# Altium footprint library WR-PHD_Pin Header_2.00mm.PcbLib: 63 footprints (part 3 of 4)
Each footprint in its own frame and in the unit in brackets; x right, y up, seen from the top. Pads: shape width x height; smd on the part's side, far side on the other; paste and mask are expansions set on the pad; w line width, h text height; cw(c..) or ccw(c..) is an arc to the next point about the centre after c.
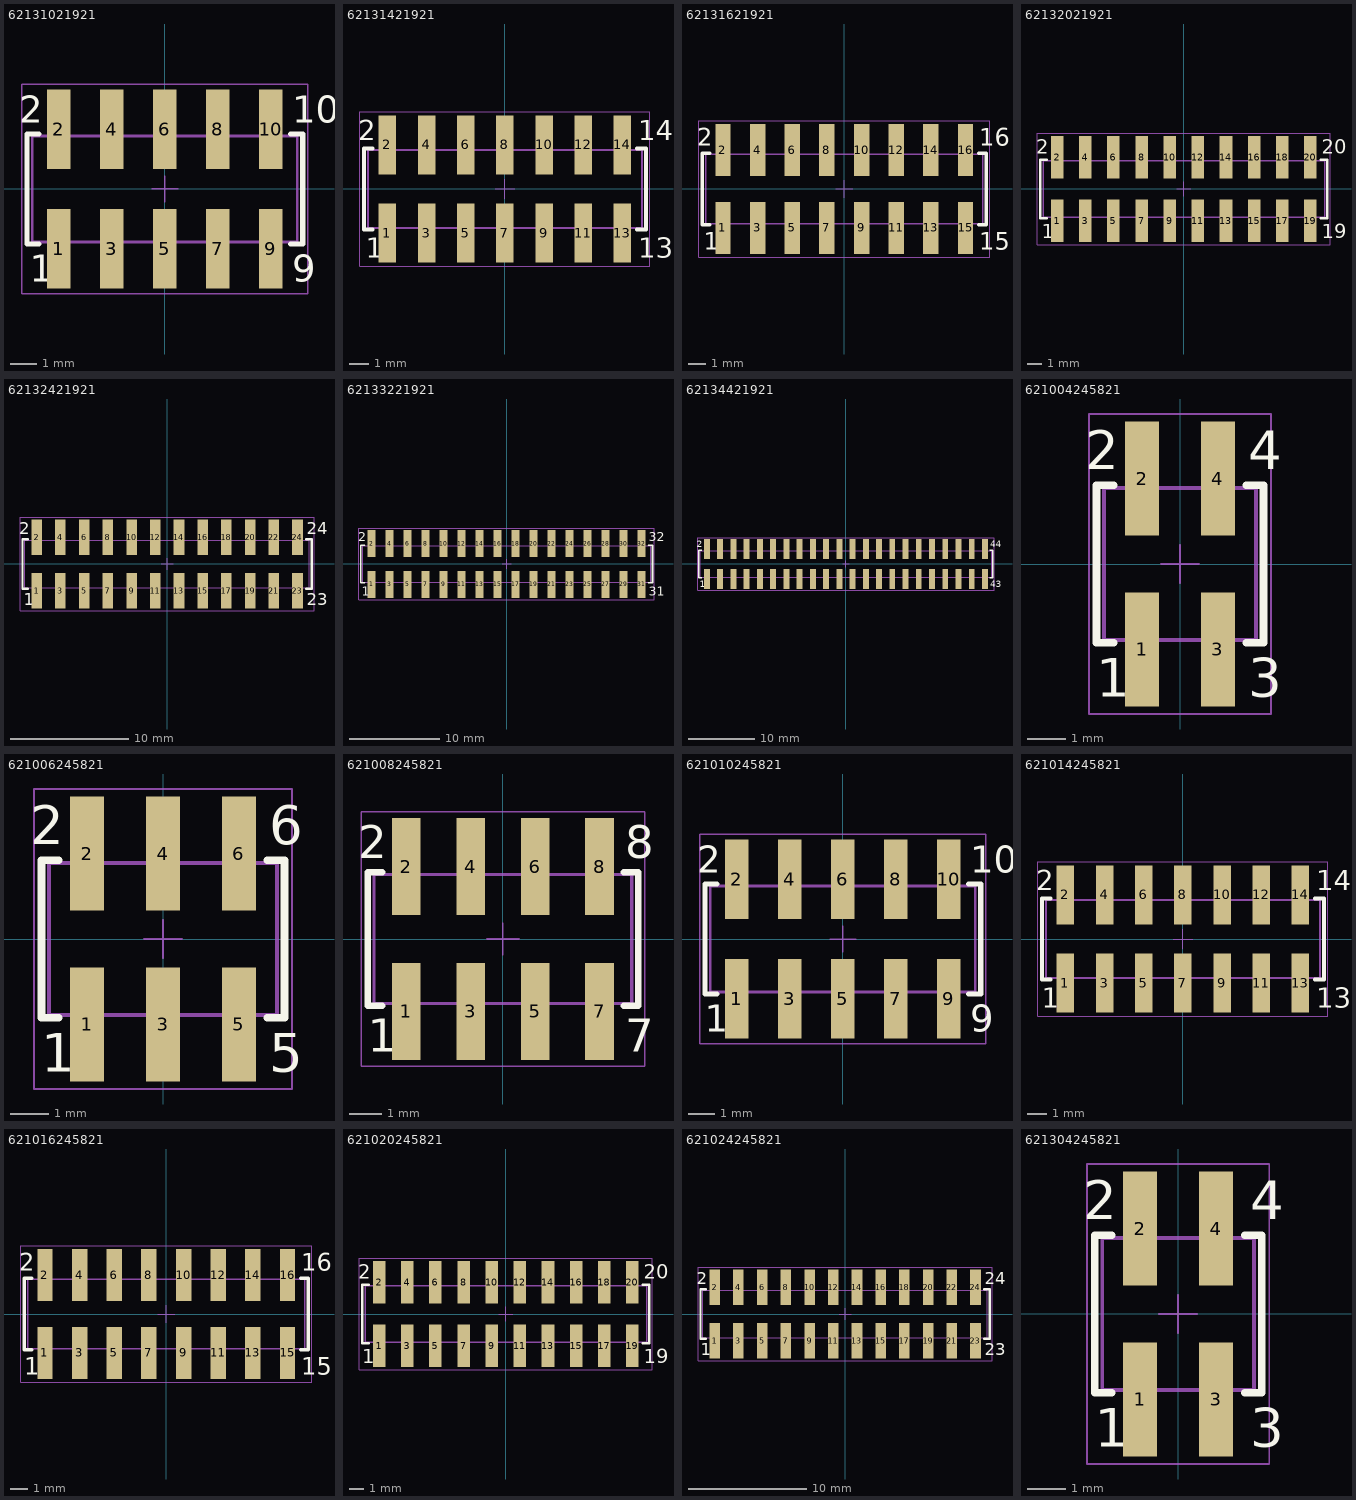
[diagram p2: the footprints below, top view; thin cyan lines are the x and y axes]

## 62131021921 [mm] "Pin Header, pitch 2.00 mm, SMD, Vertical, dual row, 10p"
height 6.8
pads (10):
  rect 0.89x3 smd: 1(-4,-2.25) 2(-4,2.25) 3(-2,-2.25) 4(-2,2.25) 5(0,-2.25) 6(0,2.25) 7(2,-2.25) 8(2,2.25) 9(4,-2.25) 10(4,2.25)
Top Overlay:
  lines w0.2: -4.75,-2.075 -5.2,-2.075 -5.2,2.075 -4.75,2.075 ; 4.75,-2.075 5.2,-2.075 5.2,2.075 4.75,2.075
  text "9" at 4.8,-3.5 h1.02
  text "10" at 4.8,2.5 h1.02
  text "1" at -5.1,-3.5 h1.02
  text "2" at -5.5,2.5 h1.02
Mechanical 13:
  lines w0.1: -4.25,-2 -4.25,-3.1 -3.75,-3.1 -3.75,-2 ; -4.25,2 -4.25,3.1 -3.75,3.1 -3.75,2 ; -2.25,-2 -2.25,-3.1 -1.75,-3.1 -1.75,-2 ; -2.25,2 -2.25,3.1 -1.75,3.1 -1.75,2 ; -0.25,-2 -0.25,-3.1 0.25,-3.1 0.25,-2 ; -0.25,2 -0.25,3.1 0.25,3.1 0.25,2 ; 1.75,-2 1.75,-3.1 2.25,-3.1 2.25,-2 ; 1.75,2 1.75,3.1 2.25,3.1 2.25,2 ; 3.75,-2 3.75,-3.1 4.25,-3.1 4.25,-2 ; 3.75,2 3.75,3.1 4.25,3.1 4.25,2 ; -5,-2 -5,2 5,2 5,-2 -5,-2
Mechanical 15:
  lines w0.05: -0.5,0 0.5,0 ; 0,-0.5 0,0.5 ; -5.4,-3.95 -5.4,3.95 5.4,3.95 5.4,-3.95 -5.4,-3.95
3D body "62131021921.stp": height 6.7, standoff 0, extent -5,-3.1 5,3.1

## 62131421921 [mm] "Pin Header, pitch 2.00 mm, SMD, Vertical, dual row, 14p"
height 6.8
pads (14):
  rect 0.89x3 smd: 1(-6,-2.25) 2(-6,2.25) 3(-4,-2.25) 4(-4,2.25) 5(-2,-2.25) 6(-2,2.25) 7(0,-2.25) 8(0,2.25) 9(2,-2.25) 10(2,2.25) 11(4,-2.25) 12(4,2.25) 13(6,-2.25) 14(6,2.25)
Top Overlay:
  lines w0.2: -6.75,-2.075 -7.2,-2.075 -7.2,2.075 -6.75,2.075 ; 6.75,-2.075 7.2,-2.075 7.2,2.075 6.75,2.075
  text "13" at 6.8,-3.5 h1.02
  text "14" at 6.8,2.5 h1.02
  text "2" at -7.5,2.5 h1.02
  text "1" at -7.1,-3.5 h1.02
Mechanical 13:
  lines w0.1: -6.25,-2 -6.25,-3.1 -5.75,-3.1 -5.75,-2 ; -6.25,2 -6.25,3.1 -5.75,3.1 -5.75,2 ; -4.25,-2 -4.25,-3.1 -3.75,-3.1 -3.75,-2 ; -4.25,2 -4.25,3.1 -3.75,3.1 -3.75,2 ; -2.25,-2 -2.25,-3.1 -1.75,-3.1 -1.75,-2 ; -2.25,2 -2.25,3.1 -1.75,3.1 -1.75,2 ; -0.25,-2 -0.25,-3.1 0.25,-3.1 0.25,-2 ; -0.25,2 -0.25,3.1 0.25,3.1 0.25,2 ; 1.75,-2 1.75,-3.1 2.25,-3.1 2.25,-2 ; 1.75,2 1.75,3.1 2.25,3.1 2.25,2 ; 3.75,-2 3.75,-3.1 4.25,-3.1 4.25,-2 ; 3.75,2 3.75,3.1 4.25,3.1 4.25,2 ; 5.75,-2 5.75,-3.1 6.25,-3.1 6.25,-2 ; 5.75,2 5.75,3.1 6.25,3.1 6.25,2 ; -7,-2 7,-2 7,2 -7,2 -7,-2
Mechanical 15:
  lines w0.05: -0.5,0 0.5,0 ; 0,-0.5 0,0.5 ; -7.4,-3.95 7.4,-3.95 7.4,3.95 -7.4,3.95 -7.4,-3.95
3D body "62131421921.stp": height 6.7, standoff 0, extent -7,-3.1 7,3.1

## 62131621921 [mm] "Pin Header, pitch 2.00 mm, SMD, Vertical, dual row, 16p"
height 6.8
pads (16):
  rect 0.89x3 smd: 1(-7,-2.25) 2(-7,2.25) 3(-5,-2.25) 4(-5,2.25) 5(-3,-2.25) 6(-3,2.25) 7(-1,-2.25) 8(-1,2.25) 9(1,-2.25) 10(1,2.25) 11(3,-2.25) 12(3,2.25) 13(5,-2.25) 14(5,2.25) 15(7,-2.25) 16(7,2.25)
Top Overlay:
  lines w0.2: -7.75,-2.075 -8.2,-2.075 -8.2,2.075 -7.75,2.075 ; 7.75,-2.075 8.2,-2.075 8.2,2.075 7.75,2.075
  text "15" at 7.8,-3.5 h1.02
  text "16" at 7.8,2.5 h1.02
  text "1" at -8.1,-3.5 h1.02
  text "2" at -8.5,2.5 h1.02
Mechanical 13:
  lines w0.1: -7.25,-2 -7.25,-3.1 -6.75,-3.1 -6.75,-2 ; -7.25,2 -7.25,3.1 -6.75,3.1 -6.75,2 ; -5.25,-2 -5.25,-3.1 -4.75,-3.1 -4.75,-2 ; -5.25,2 -5.25,3.1 -4.75,3.1 -4.75,2 ; -3.25,-2 -3.25,-3.1 -2.75,-3.1 -2.75,-2 ; -3.25,2 -3.25,3.1 -2.75,3.1 -2.75,2 ; -1.25,-2 -1.25,-3.1 -0.75,-3.1 -0.75,-2 ; -1.25,2 -1.25,3.1 -0.75,3.1 -0.75,2 ; 0.75,-2 0.75,-3.1 1.25,-3.1 1.25,-2 ; 0.75,2 0.75,3.1 1.25,3.1 1.25,2 ; 2.75,-2 2.75,-3.1 3.25,-3.1 3.25,-2 ; 2.75,2 2.75,3.1 3.25,3.1 3.25,2 ; 4.75,-2 4.75,-3.1 5.25,-3.1 5.25,-2 ; 4.75,2 4.75,3.1 5.25,3.1 5.25,2 ; 6.75,-2 6.75,-3.1 7.25,-3.1 7.25,-2 ; 6.75,2 6.75,3.1 7.25,3.1 7.25,2 ; -8,-2 -8,2 8,2 8,-2 -8,-2
Mechanical 15:
  lines w0.05: -0.5,0 0.5,0 ; 0,-0.5 0,0.5 ; -8.4,-3.95 -8.4,3.95 8.4,3.95 8.4,-3.95 -8.4,-3.95
3D body "62131621921.stp": height 6.7, standoff 0, extent -8,-3.1 8,3.1

## 62132021921 [mm] "Pin Header, pitch 2.00 mm, SMD, Vertical, dual row, 20p"
height 6.8
pads (20):
  rect 0.89x3 smd: 1(-9,-2.25) 2(-9,2.25) 3(-7,-2.25) 4(-7,2.25) 5(-5,-2.25) 6(-5,2.25) 7(-3,-2.25) 8(-3,2.25) 9(-1,-2.25) 10(-1,2.25) 11(1,-2.25) 12(1,2.25) 13(3,-2.25) 14(3,2.25) 15(5,-2.25) 16(5,2.25) 17(7,-2.25) 18(7,2.25) 19(9,-2.25) 20(9,2.25)
Top Overlay:
  lines w0.2: -9.75,-2.075 -10.2,-2.075 -10.2,2.075 -9.75,2.075 ; 9.75,-2.075 10.2,-2.075 10.2,2.075 9.75,2.075
  text "19" at 9.8,-3.5 h1.02
  text "20" at 9.8,2.5 h1.02
  text "2" at -10.5,2.5 h1.02
  text "1" at -10.1,-3.5 h1.02
Mechanical 13:
  lines w0.1: -9.25,-2 -9.25,-3.1 -8.75,-3.1 -8.75,-2 ; -9.25,2 -9.25,3.1 -8.75,3.1 -8.75,2 ; -7.25,-2 -7.25,-3.1 -6.75,-3.1 -6.75,-2 ; -7.25,2 -7.25,3.1 -6.75,3.1 -6.75,2 ; -5.25,-2 -5.25,-3.1 -4.75,-3.1 -4.75,-2 ; -5.25,2 -5.25,3.1 -4.75,3.1 -4.75,2 ; -3.25,-2 -3.25,-3.1 -2.75,-3.1 -2.75,-2 ; -3.25,2 -3.25,3.1 -2.75,3.1 -2.75,2 ; -1.25,-2 -1.25,-3.1 -0.75,-3.1 -0.75,-2 ; -1.25,2 -1.25,3.1 -0.75,3.1 -0.75,2 ; 0.75,-2 0.75,-3.1 1.25,-3.1 1.25,-2 ; 0.75,2 0.75,3.1 1.25,3.1 1.25,2 ; 2.75,-2 2.75,-3.1 3.25,-3.1 3.25,-2 ; 2.75,2 2.75,3.1 3.25,3.1 3.25,2 ; 4.75,-2 4.75,-3.1 5.25,-3.1 5.25,-2 ; 4.75,2 4.75,3.1 5.25,3.1 5.25,2 ; 6.75,-2 6.75,-3.1 7.25,-3.1 7.25,-2 ; 6.75,2 6.75,3.1 7.25,3.1 7.25,2 ; 8.75,-2 8.75,-3.1 9.25,-3.1 9.25,-2 ; 8.75,2 8.75,3.1 9.25,3.1 9.25,2 ; -10,-2 10,-2 10,2 -10,2 -10,-2
Mechanical 15:
  lines w0.05: -0.5,0 0.5,0 ; 0,-0.5 0,0.5 ; -10.4,-3.95 10.4,-3.95 10.4,3.95 -10.4,3.95 -10.4,-3.95
3D body "62132021921.stp": height 6.7, standoff 0, extent -10,-3.1 10,3.1

## 62132421921 [mm] "Pin Header, pitch 2.00 mm, SMD, Vertical, dual row, 24p"
height 6.8
pads (24):
  rect 0.89x3 smd: 1(-11,-2.25) 2(-11,2.25) 3(-9,-2.25) 4(-9,2.25) 5(-7,-2.25) 6(-7,2.25) 7(-5,-2.25) 8(-5,2.25) 9(-3,-2.25) 10(-3,2.25) 11(-1,-2.25) 12(-1,2.25) 13(1,-2.25) 14(1,2.25) 15(3,-2.25) 16(3,2.25) 17(5,-2.25) 18(5,2.25) 19(7,-2.25) 20(7,2.25) 21(9,-2.25) 22(9,2.25) 23(11,-2.25) 24(11,2.25)
Top Overlay:
  lines w0.2: -11.75,-2.075 -12.2,-2.075 -12.2,2.075 -11.75,2.075 ; 11.75,-2.075 12.2,-2.075 12.2,2.075 11.75,2.075
  text "2" at -12.5,2.5 h1.02
  text "1" at -12.1,-3.5 h1.02
  text "24" at 11.8,2.5 h1.02
  text "23" at 11.8,-3.5 h1.02
Mechanical 13:
  lines w0.1: -11.25,-2 -11.25,-3.1 -10.75,-3.1 -10.75,-2 ; -11.25,2 -11.25,3.1 -10.75,3.1 -10.75,2 ; -9.25,-2 -9.25,-3.1 -8.75,-3.1 -8.75,-2 ; -9.25,2 -9.25,3.1 -8.75,3.1 -8.75,2 ; -7.25,-2 -7.25,-3.1 -6.75,-3.1 -6.75,-2 ; -7.25,2 -7.25,3.1 -6.75,3.1 -6.75,2 ; -5.25,-2 -5.25,-3.1 -4.75,-3.1 -4.75,-2 ; -5.25,2 -5.25,3.1 -4.75,3.1 -4.75,2 ; -3.25,-2 -3.25,-3.1 -2.75,-3.1 -2.75,-2 ; -3.25,2 -3.25,3.1 -2.75,3.1 -2.75,2 ; -1.25,-2 -1.25,-3.1 -0.75,-3.1 -0.75,-2 ; -1.25,2 -1.25,3.1 -0.75,3.1 -0.75,2 ; 0.75,-2 0.75,-3.1 1.25,-3.1 1.25,-2 ; 0.75,2 0.75,3.1 1.25,3.1 1.25,2 ; 2.75,-2 2.75,-3.1 3.25,-3.1 3.25,-2 ; 2.75,2 2.75,3.1 3.25,3.1 3.25,2 ; 4.75,-2 4.75,-3.1 5.25,-3.1 5.25,-2 ; 4.75,2 4.75,3.1 5.25,3.1 5.25,2 ; 6.75,-2 6.75,-3.1 7.25,-3.1 7.25,-2 ; 6.75,2 6.75,3.1 7.25,3.1 7.25,2 ; 8.75,-2 8.75,-3.1 9.25,-3.1 9.25,-2 ; 8.75,2 8.75,3.1 9.25,3.1 9.25,2 ; 10.75,-2 10.75,-3.1 11.25,-3.1 11.25,-2 ; 10.75,2 10.75,3.1 11.25,3.1 11.25,2 ; -12,-2 12,-2 12,2 -12,2 -12,-2
Mechanical 15:
  lines w0.05: -0.5,0 0.5,0 ; 0,-0.5 0,0.5 ; -12.4,-3.95 12.4,-3.95 12.4,3.95 -12.4,3.95 -12.4,-3.95
3D body "62132421921.stp": height 6.7, standoff 0, extent -12,-3.1 12,3.1

## 62133221921 [mm] "Pin Header, pitch 2.00 mm, SMD, Vertical, dual row, 32p"
height 6.8
pads (32):
  rect 0.89x3 smd: 1(-15,-2.25) 2(-15,2.25) 3(-13,-2.25) 4(-13,2.25) 5(-11,-2.25) 6(-11,2.25) 7(-9,-2.25) 8(-9,2.25) 9(-7,-2.25) 10(-7,2.25) 11(-5,-2.25) 12(-5,2.25) 13(-3,-2.25) 14(-3,2.25) 15(-1,-2.25) 16(-1,2.25) 17(1,-2.25) 18(1,2.25) 19(3,-2.25) 20(3,2.25) 21(5,-2.25) 22(5,2.25) 23(7,-2.25) 24(7,2.25) 25(9,-2.25) 26(9,2.25) 27(11,-2.25) 28(11,2.25) 29(13,-2.25) 30(13,2.25) 31(15,-2.25) 32(15,2.25)
Top Overlay:
  lines w0.2: -15.75,-2.075 -16.2,-2.075 -16.2,2.075 -15.75,2.075 ; 15.75,-2.075 16.2,-2.075 16.2,2.075 15.75,2.075
  text "31" at 15.8,-3.5 h1.02
  text "32" at 15.8,2.5 h1.02
  text "1" at -16.1,-3.5 h1.02
  text "2" at -16.5,2.5 h1.02
Mechanical 13:
  lines w0.1: -15.25,-2 -15.25,-3.1 -14.75,-3.1 -14.75,-2 ; -15.25,2 -15.25,3.1 -14.75,3.1 -14.75,2 ; -13.25,-2 -13.25,-3.1 -12.75,-3.1 -12.75,-2 ; -13.25,2 -13.25,3.1 -12.75,3.1 -12.75,2 ; -11.25,-2 -11.25,-3.1 -10.75,-3.1 -10.75,-2 ; -11.25,2 -11.25,3.1 -10.75,3.1 -10.75,2 ; -9.25,-2 -9.25,-3.1 -8.75,-3.1 -8.75,-2 ; -9.25,2 -9.25,3.1 -8.75,3.1 -8.75,2 ; -7.25,-2 -7.25,-3.1 -6.75,-3.1 -6.75,-2 ; -7.25,2 -7.25,3.1 -6.75,3.1 -6.75,2 ; -5.25,-2 -5.25,-3.1 -4.75,-3.1 -4.75,-2 ; -5.25,2 -5.25,3.1 -4.75,3.1 -4.75,2 ; -3.25,-2 -3.25,-3.1 -2.75,-3.1 -2.75,-2 ; -3.25,2 -3.25,3.1 -2.75,3.1 -2.75,2 ; -1.25,-2 -1.25,-3.1 -0.75,-3.1 -0.75,-2 ; -1.25,2 -1.25,3.1 -0.75,3.1 -0.75,2 ; 0.75,-2 0.75,-3.1 1.25,-3.1 1.25,-2 ; 0.75,2 0.75,3.1 1.25,3.1 1.25,2 ; 2.75,-2 2.75,-3.1 3.25,-3.1 3.25,-2 ; 2.75,2 2.75,3.1 3.25,3.1 3.25,2 ; 4.75,-2 4.75,-3.1 5.25,-3.1 5.25,-2 ; 4.75,2 4.75,3.1 5.25,3.1 5.25,2 ; 6.75,-2 6.75,-3.1 7.25,-3.1 7.25,-2 ; 6.75,2 6.75,3.1 7.25,3.1 7.25,2 ; 8.75,-2 8.75,-3.1 9.25,-3.1 9.25,-2 ; 8.75,2 8.75,3.1 9.25,3.1 9.25,2 ; 10.75,-2 10.75,-3.1 11.25,-3.1 11.25,-2 ; 10.75,2 10.75,3.1 11.25,3.1 11.25,2 ; 12.75,-2 12.75,-3.1 13.25,-3.1 13.25,-2 ; 12.75,2 12.75,3.1 13.25,3.1 13.25,2 ; 14.75,-2 14.75,-3.1 15.25,-3.1 15.25,-2 ; 14.75,2 14.75,3.1 15.25,3.1 15.25,2 ; -16,-2 -16,2 16,2 16,-2 -16,-2
Mechanical 15:
  lines w0.05: -0.5,0 0.5,0 ; 0,-0.5 0,0.5 ; -16.4,-3.95 -16.4,3.95 16.4,3.95 16.4,-3.95 -16.4,-3.95
3D body "62133221921.stp": height 6.7, standoff 0, extent -16,-3.1 16,3.1

## 62134421921 [mm] "Pin Header, pitch 2.00 mm, SMD, Vertical, dual row, 44p"
height 6.8
pads (44):
  rect 0.89x3 smd: 1(-21,-2.25) 2(-21,2.25) 3(-19,-2.25) 4(-19,2.25) 5(-17,-2.25) 6(-17,2.25) 7(-15,-2.25) 8(-15,2.25) 9(-13,-2.25) 10(-13,2.25) 11(-11,-2.25) 12(-11,2.25) 13(-9,-2.25) 14(-9,2.25) 15(-7,-2.25) 16(-7,2.25) 17(-5,-2.25) 18(-5,2.25) 19(-3,-2.25) 20(-3,2.25) 21(-1,-2.25) 22(-1,2.25) 23(1,-2.25) 24(1,2.25) 25(3,-2.25) 26(3,2.25) 27(5,-2.25) 28(5,2.25) 29(7,-2.25) 30(7,2.25) 31(9,-2.25) 32(9,2.25) 33(11,-2.25) 34(11,2.25) 35(13,-2.25) 36(13,2.25) 37(15,-2.25) 38(15,2.25) 39(17,-2.25) 40(17,2.25) 41(19,-2.25) 42(19,2.25) 43(21,-2.25) 44(21,2.25)
Top Overlay:
  lines w0.2: -21.75,-2.075 -22.2,-2.075 -22.2,2.075 -21.75,2.075 ; 21.75,-2.075 22.2,-2.075 22.2,2.075 21.75,2.075
  text "43" at 21.8,-3.5 h1.02
  text "44" at 21.8,2.5 h1.02
  text "2" at -22.5,2.5 h1.02
  text "1" at -22.1,-3.5 h1.02
Mechanical 13:
  lines w0.1: -21.25,-2 -21.25,-3.1 -20.75,-3.1 -20.75,-2 ; -21.25,2 -21.25,3.1 -20.75,3.1 -20.75,2 ; -19.25,-2 -19.25,-3.1 -18.75,-3.1 -18.75,-2 ; -19.25,2 -19.25,3.1 -18.75,3.1 -18.75,2 ; -17.25,-2 -17.25,-3.1 -16.75,-3.1 -16.75,-2 ; -17.25,2 -17.25,3.1 -16.75,3.1 -16.75,2 ; -15.25,-2 -15.25,-3.1 -14.75,-3.1 -14.75,-2 ; -15.25,2 -15.25,3.1 -14.75,3.1 -14.75,2 ; -13.25,-2 -13.25,-3.1 -12.75,-3.1 -12.75,-2 ; -13.25,2 -13.25,3.1 -12.75,3.1 -12.75,2 ; -11.25,-2 -11.25,-3.1 -10.75,-3.1 -10.75,-2 ; -11.25,2 -11.25,3.1 -10.75,3.1 -10.75,2 ; -9.25,-2 -9.25,-3.1 -8.75,-3.1 -8.75,-2 ; -9.25,2 -9.25,3.1 -8.75,3.1 -8.75,2 ; -7.25,-2 -7.25,-3.1 -6.75,-3.1 -6.75,-2 ; -7.25,2 -7.25,3.1 -6.75,3.1 -6.75,2 ; -5.25,-2 -5.25,-3.1 -4.75,-3.1 -4.75,-2 ; -5.25,2 -5.25,3.1 -4.75,3.1 -4.75,2 ; -3.25,-2 -3.25,-3.1 -2.75,-3.1 -2.75,-2 ; -3.25,2 -3.25,3.1 -2.75,3.1 -2.75,2 ; -1.25,-2 -1.25,-3.1 -0.75,-3.1 -0.75,-2 ; -1.25,2 -1.25,3.1 -0.75,3.1 -0.75,2 ; 0.75,-2 0.75,-3.1 1.25,-3.1 1.25,-2 ; 0.75,2 0.75,3.1 1.25,3.1 1.25,2 ; 2.75,-2 2.75,-3.1 3.25,-3.1 3.25,-2 ; 2.75,2 2.75,3.1 3.25,3.1 3.25,2 ; 4.75,-2 4.75,-3.1 5.25,-3.1 5.25,-2 ; 4.75,2 4.75,3.1 5.25,3.1 5.25,2 ; 6.75,-2 6.75,-3.1 7.25,-3.1 7.25,-2 ; 6.75,2 6.75,3.1 7.25,3.1 7.25,2 ; 8.75,-2 8.75,-3.1 9.25,-3.1 9.25,-2 ; 8.75,2 8.75,3.1 9.25,3.1 9.25,2 ; 10.75,-2 10.75,-3.1 11.25,-3.1 11.25,-2 ; 10.75,2 10.75,3.1 11.25,3.1 11.25,2 ; 12.75,-2 12.75,-3.1 13.25,-3.1 13.25,-2 ; 12.75,2 12.75,3.1 13.25,3.1 13.25,2 ; 14.75,-2 14.75,-3.1 15.25,-3.1 15.25,-2 ; 14.75,2 14.75,3.1 15.25,3.1 15.25,2 ; 16.75,-2 16.75,-3.1 17.25,-3.1 17.25,-2 ; 16.75,2 16.75,3.1 17.25,3.1 17.25,2 ; 18.75,-2 18.75,-3.1 19.25,-3.1 19.25,-2 ; 18.75,2 18.75,3.1 19.25,3.1 19.25,2 ; 20.75,-2 20.75,-3.1 21.25,-3.1 21.25,-2 ; 20.75,2 20.75,3.1 21.25,3.1 21.25,2 ; -22,-2 22,-2 22,2 -22,2 -22,-2
Mechanical 15:
  lines w0.05: -0.5,0 0.5,0 ; 0,-0.5 0,0.5 ; -22.4,-3.95 22.4,-3.95 22.4,3.95 -22.4,3.95 -22.4,-3.95
3D body "62134421921.stp": height 6.7, standoff 0, extent -22,-3.1 22,3.1

## 621004245821 [mm] "Pin Header, pitch 2.00 mm, SMD, Vertical, dual row, 4p"
height 4.8
pads (4):
  rect 0.89x3 smd: 1(-1,-2.25) 2(-1,2.25) 3(1,-2.25) 4(1,2.25)
Top Overlay:
  lines w0.2: -1.75,-2.075 -2.2,-2.075 -2.2,2.075 -1.75,2.075 ; 1.75,-2.075 2.2,-2.075 2.2,2.075 1.75,2.075
  text "1" at -2.2,-3.5 h1.02
  text "3" at 1.8,-3.5 h1.02
  text "2" at -2.5,2.5 h1.02
  text "4" at 1.8,2.5 h1.02
Mechanical 13:
  lines w0.1: -1.25,-2 -1.25,-3.1 -0.75,-3.1 -0.75,-2 ; -1.25,2 -1.25,3.1 -0.75,3.1 -0.75,2 ; 0.75,-2 0.75,-3.1 1.25,-3.1 1.25,-2 ; 0.75,2 0.75,3.1 1.25,3.1 1.25,2 ; -2,-2 2,-2 2,2 -2,2 -2,-2
Mechanical 15:
  lines w0.05: -0.5,0 0.5,0 ; 0,-0.5 0,0.5 ; -2.4,-3.95 2.4,-3.95 2.4,3.95 -2.4,3.95 -2.4,-3.95
3D body "621004245821.stp": height 4.7, standoff 0, extent -2,-3.1 2,3.1

## 621006245821 [mm] "Pin Header, pitch 2.00 mm, SMD, Vertical, dual row, 6p"
height 4.8
pads (6):
  rect 0.89x3 smd: 1(-2,-2.25) 2(-2,2.25) 3(0,-2.25) 4(0,2.25) 5(2,-2.25) 6(2,2.25)
Top Overlay:
  lines w0.2: -2.75,-2.075 -3.2,-2.075 -3.2,2.075 -2.75,2.075 ; 2.75,-2.075 3.2,-2.075 3.2,2.075 2.75,2.075
  text "5" at 2.8,-3.5 h1.02
  text "6" at 2.8,2.5 h1.02
  text "2" at -3.5,2.5 h1.02
  text "1" at -3.2,-3.5 h1.02
Mechanical 13:
  lines w0.1: -2.25,-2 -2.25,-3.1 -1.75,-3.1 -1.75,-2 ; -2.25,2 -2.25,3.1 -1.75,3.1 -1.75,2 ; -0.25,-2 -0.25,-3.1 0.25,-3.1 0.25,-2 ; -0.25,2 -0.25,3.1 0.25,3.1 0.25,2 ; 1.75,-2 1.75,-3.1 2.25,-3.1 2.25,-2 ; 1.75,2 1.75,3.1 2.25,3.1 2.25,2 ; -3,-2 -3,2 3,2 3,-2 -3,-2
Mechanical 15:
  lines w0.05: -0.5,0 0.5,0 ; 0,-0.5 0,0.5 ; -3.4,-3.95 -3.4,3.95 3.4,3.95 3.4,-3.95 -3.4,-3.95
3D body "621006245821.stp": height 4.7, standoff 0, extent -3,-3.1 3,3.1

## 621008245821 [mm] "Pin Header, pitch 2.00 mm, SMD, Vertical, dual row, 8p"
height 4.8
pads (8):
  rect 0.89x3 smd: 1(-3,-2.25) 2(-3,2.25) 3(-1,-2.25) 4(-1,2.25) 5(1,-2.25) 6(1,2.25) 7(3,-2.25) 8(3,2.25)
Top Overlay:
  lines w0.2: -3.75,-2.075 -4.2,-2.075 -4.2,2.075 -3.75,2.075 ; 3.75,-2.075 4.2,-2.075 4.2,2.075 3.75,2.075
  text "7" at 3.8,-3.5 h1.02
  text "8" at 3.8,2.5 h1.02
  text "1" at -4.2,-3.5 h1.02
  text "2" at -4.5,2.5 h1.02
Mechanical 13:
  lines w0.1: -3.25,-2 -3.25,-3.1 -2.75,-3.1 -2.75,-2 ; -3.25,2 -3.25,3.1 -2.75,3.1 -2.75,2 ; -1.25,-2 -1.25,-3.1 -0.75,-3.1 -0.75,-2 ; -1.25,2 -1.25,3.1 -0.75,3.1 -0.75,2 ; 0.75,-2 0.75,-3.1 1.25,-3.1 1.25,-2 ; 0.75,2 0.75,3.1 1.25,3.1 1.25,2 ; 2.75,-2 2.75,-3.1 3.25,-3.1 3.25,-2 ; 2.75,2 2.75,3.1 3.25,3.1 3.25,2 ; -4,-2 4,-2 4,2 -4,2 -4,-2
Mechanical 15:
  lines w0.05: -0.5,0 0.5,0 ; 0,-0.5 0,0.5 ; -4.4,-3.95 4.4,-3.95 4.4,3.95 -4.4,3.95 -4.4,-3.95
3D body "621008245821.stp": height 4.7, standoff 0, extent -4,-3.1 4,3.1

## 621010245821 [mm] "Pin Header, pitch 2.00 mm, SMD, Vertical, dual row, 10p"
height 4.8
pads (10):
  rect 0.89x3 smd: 1(-4,-2.25) 2(-4,2.25) 3(-2,-2.25) 4(-2,2.25) 5(0,-2.25) 6(0,2.25) 7(2,-2.25) 8(2,2.25) 9(4,-2.25) 10(4,2.25)
Top Overlay:
  lines w0.2: -4.75,-2.075 -5.2,-2.075 -5.2,2.075 -4.75,2.075 ; 4.75,-2.075 5.2,-2.075 5.2,2.075 4.75,2.075
  text "9" at 4.8,-3.5 h1.02
  text "10" at 4.8,2.5 h1.02
  text "1" at -5.2,-3.5 h1.02
  text "2" at -5.5,2.5 h1.02
Mechanical 13:
  lines w0.1: -4.25,-2 -4.25,-3.1 -3.75,-3.1 -3.75,-2 ; -4.25,2 -4.25,3.1 -3.75,3.1 -3.75,2 ; -2.25,-2 -2.25,-3.1 -1.75,-3.1 -1.75,-2 ; -2.25,2 -2.25,3.1 -1.75,3.1 -1.75,2 ; -0.25,-2 -0.25,-3.1 0.25,-3.1 0.25,-2 ; -0.25,2 -0.25,3.1 0.25,3.1 0.25,2 ; 1.75,-2 1.75,-3.1 2.25,-3.1 2.25,-2 ; 1.75,2 1.75,3.1 2.25,3.1 2.25,2 ; 3.75,-2 3.75,-3.1 4.25,-3.1 4.25,-2 ; 3.75,2 3.75,3.1 4.25,3.1 4.25,2 ; -5,-2 5,-2 5,2 -5,2 -5,-2
Mechanical 15:
  lines w0.05: -0.5,0 0.5,0 ; 0,-0.5 0,0.5 ; -5.4,-3.95 5.4,-3.95 5.4,3.95 -5.4,3.95 -5.4,-3.95
3D body "621010245821.stp": height 4.7, standoff 0, extent -5,-3.1 5,3.1

## 621014245821 [mm] "Pin Header, pitch 2.00 mm, SMD, Vertical, dual row, 14p"
height 4.8
pads (14):
  rect 0.89x3 smd: 1(-6,-2.25) 2(-6,2.25) 3(-4,-2.25) 4(-4,2.25) 5(-2,-2.25) 6(-2,2.25) 7(0,-2.25) 8(0,2.25) 9(2,-2.25) 10(2,2.25) 11(4,-2.25) 12(4,2.25) 13(6,-2.25) 14(6,2.25)
Top Overlay:
  lines w0.2: -6.75,-2.075 -7.2,-2.075 -7.2,2.075 -6.75,2.075 ; 6.75,-2.075 7.2,-2.075 7.2,2.075 6.75,2.075
  text "13" at 6.8,-3.5 h1.02
  text "14" at 6.8,2.5 h1.02
  text "2" at -7.5,2.5 h1.02
  text "1" at -7.2,-3.5 h1.02
Mechanical 13:
  lines w0.1: -6.25,-2 -6.25,-3.1 -5.75,-3.1 -5.75,-2 ; -6.25,2 -6.25,3.1 -5.75,3.1 -5.75,2 ; -4.25,-2 -4.25,-3.1 -3.75,-3.1 -3.75,-2 ; -4.25,2 -4.25,3.1 -3.75,3.1 -3.75,2 ; -2.25,-2 -2.25,-3.1 -1.75,-3.1 -1.75,-2 ; -2.25,2 -2.25,3.1 -1.75,3.1 -1.75,2 ; -0.25,-2 -0.25,-3.1 0.25,-3.1 0.25,-2 ; -0.25,2 -0.25,3.1 0.25,3.1 0.25,2 ; 1.75,-2 1.75,-3.1 2.25,-3.1 2.25,-2 ; 1.75,2 1.75,3.1 2.25,3.1 2.25,2 ; 3.75,-2 3.75,-3.1 4.25,-3.1 4.25,-2 ; 3.75,2 3.75,3.1 4.25,3.1 4.25,2 ; 5.75,-2 5.75,-3.1 6.25,-3.1 6.25,-2 ; 5.75,2 5.75,3.1 6.25,3.1 6.25,2 ; -7,-2 -7,2 7,2 7,-2 -7,-2
Mechanical 15:
  lines w0.05: -0.5,0 0.5,0 ; 0,-0.5 0,0.5 ; -7.4,-3.95 -7.4,3.95 7.4,3.95 7.4,-3.95 -7.4,-3.95
3D body "621014245821.stp": height 4.7, standoff 0, extent -7,-3.1 7,3.1

## 621016245821 [mm] "Pin Header, pitch 2.00 mm, SMD, Vertical, dual row, 16p"
height 4.8
pads (16):
  rect 0.89x3 smd: 1(-7,-2.25) 2(-7,2.25) 3(-5,-2.25) 4(-5,2.25) 5(-3,-2.25) 6(-3,2.25) 7(-1,-2.25) 8(-1,2.25) 9(1,-2.25) 10(1,2.25) 11(3,-2.25) 12(3,2.25) 13(5,-2.25) 14(5,2.25) 15(7,-2.25) 16(7,2.25)
Top Overlay:
  lines w0.2: -7.75,-2.075 -8.2,-2.075 -8.2,2.075 -7.75,2.075 ; 7.75,-2.075 8.2,-2.075 8.2,2.075 7.75,2.075
  text "2" at -8.5,2.5 h1.02
  text "1" at -8.2,-3.5 h1.02
  text "16" at 7.8,2.5 h1.02
  text "15" at 7.8,-3.5 h1.02
Mechanical 13:
  lines w0.1: -7.25,-2 -7.25,-3.1 -6.75,-3.1 -6.75,-2 ; -7.25,2 -7.25,3.1 -6.75,3.1 -6.75,2 ; -5.25,-2 -5.25,-3.1 -4.75,-3.1 -4.75,-2 ; -5.25,2 -5.25,3.1 -4.75,3.1 -4.75,2 ; -3.25,-2 -3.25,-3.1 -2.75,-3.1 -2.75,-2 ; -3.25,2 -3.25,3.1 -2.75,3.1 -2.75,2 ; -1.25,-2 -1.25,-3.1 -0.75,-3.1 -0.75,-2 ; -1.25,2 -1.25,3.1 -0.75,3.1 -0.75,2 ; 0.75,-2 0.75,-3.1 1.25,-3.1 1.25,-2 ; 0.75,2 0.75,3.1 1.25,3.1 1.25,2 ; 2.75,-2 2.75,-3.1 3.25,-3.1 3.25,-2 ; 2.75,2 2.75,3.1 3.25,3.1 3.25,2 ; 4.75,-2 4.75,-3.1 5.25,-3.1 5.25,-2 ; 4.75,2 4.75,3.1 5.25,3.1 5.25,2 ; 6.75,-2 6.75,-3.1 7.25,-3.1 7.25,-2 ; 6.75,2 6.75,3.1 7.25,3.1 7.25,2 ; -8,-2 -8,2 8,2 8,-2 -8,-2
Mechanical 15:
  lines w0.05: -0.5,0 0.5,0 ; 0,-0.5 0,0.5 ; -8.4,-3.95 -8.4,3.95 8.4,3.95 8.4,-3.95 -8.4,-3.95
3D body "621016245821.stp": height 4.7, standoff 0, extent -8,-3.1 8,3.1

## 621020245821 [mm] "Pin Header, pitch 2.00 mm, SMD, Vertical, dual row, 20p"
height 4.8
pads (20):
  rect 0.89x3 smd: 1(-9,-2.25) 2(-9,2.25) 3(-7,-2.25) 4(-7,2.25) 5(-5,-2.25) 6(-5,2.25) 7(-3,-2.25) 8(-3,2.25) 9(-1,-2.25) 10(-1,2.25) 11(1,-2.25) 12(1,2.25) 13(3,-2.25) 14(3,2.25) 15(5,-2.25) 16(5,2.25) 17(7,-2.25) 18(7,2.25) 19(9,-2.25) 20(9,2.25)
Top Overlay:
  lines w0.2: -9.75,-2.075 -10.2,-2.075 -10.2,2.075 -9.75,2.075 ; 9.75,-2.075 10.2,-2.075 10.2,2.075 9.75,2.075
  text "1" at -10.2,-3.5 h1.02
  text "2" at -10.5,2.5 h1.02
  text "20" at 9.8,2.5 h1.02
  text "19" at 9.8,-3.5 h1.02
Mechanical 13:
  lines w0.1: -9.25,-2 -9.25,-3.1 -8.75,-3.1 -8.75,-2 ; -9.25,2 -9.25,3.1 -8.75,3.1 -8.75,2 ; -7.25,-2 -7.25,-3.1 -6.75,-3.1 -6.75,-2 ; -7.25,2 -7.25,3.1 -6.75,3.1 -6.75,2 ; -5.25,-2 -5.25,-3.1 -4.75,-3.1 -4.75,-2 ; -5.25,2 -5.25,3.1 -4.75,3.1 -4.75,2 ; -3.25,-2 -3.25,-3.1 -2.75,-3.1 -2.75,-2 ; -3.25,2 -3.25,3.1 -2.75,3.1 -2.75,2 ; -1.25,-2 -1.25,-3.1 -0.75,-3.1 -0.75,-2 ; -1.25,2 -1.25,3.1 -0.75,3.1 -0.75,2 ; 0.75,-2 0.75,-3.1 1.25,-3.1 1.25,-2 ; 0.75,2 0.75,3.1 1.25,3.1 1.25,2 ; 2.75,-2 2.75,-3.1 3.25,-3.1 3.25,-2 ; 2.75,2 2.75,3.1 3.25,3.1 3.25,2 ; 4.75,-2 4.75,-3.1 5.25,-3.1 5.25,-2 ; 4.75,2 4.75,3.1 5.25,3.1 5.25,2 ; 6.75,-2 6.75,-3.1 7.25,-3.1 7.25,-2 ; 6.75,2 6.75,3.1 7.25,3.1 7.25,2 ; 8.75,-2 8.75,-3.1 9.25,-3.1 9.25,-2 ; 8.75,2 8.75,3.1 9.25,3.1 9.25,2 ; -10,-2 10,-2 10,2 -10,2 -10,-2
Mechanical 15:
  lines w0.05: -0.5,0 0.5,0 ; 0,-0.5 0,0.5 ; -10.4,-3.95 10.4,-3.95 10.4,3.95 -10.4,3.95 -10.4,-3.95
3D body "621020245821.stp": height 4.7, standoff 0, extent -10,-3.1 10,3.1

## 621024245821 [mm] "Pin Header, pitch 2.00 mm, SMD, Vertical, dual row, 24p"
height 4.8
pads (24):
  rect 0.89x3 smd: 1(-11,-2.25) 2(-11,2.25) 3(-9,-2.25) 4(-9,2.25) 5(-7,-2.25) 6(-7,2.25) 7(-5,-2.25) 8(-5,2.25) 9(-3,-2.25) 10(-3,2.25) 11(-1,-2.25) 12(-1,2.25) 13(1,-2.25) 14(1,2.25) 15(3,-2.25) 16(3,2.25) 17(5,-2.25) 18(5,2.25) 19(7,-2.25) 20(7,2.25) 21(9,-2.25) 22(9,2.25) 23(11,-2.25) 24(11,2.25)
Top Overlay:
  lines w0.2: -11.75,-2.075 -12.2,-2.075 -12.2,2.075 -11.75,2.075 ; 11.75,-2.075 12.2,-2.075 12.2,2.075 11.75,2.075
  text "23" at 11.8,-3.5 h1.02
  text "24" at 11.8,2.5 h1.02
  text "1" at -12.2,-3.5 h1.02
  text "2" at -12.5,2.5 h1.02
Mechanical 13:
  lines w0.1: -11.25,-2 -11.25,-3.1 -10.75,-3.1 -10.75,-2 ; -11.25,2 -11.25,3.1 -10.75,3.1 -10.75,2 ; -9.25,-2 -9.25,-3.1 -8.75,-3.1 -8.75,-2 ; -9.25,2 -9.25,3.1 -8.75,3.1 -8.75,2 ; -7.25,-2 -7.25,-3.1 -6.75,-3.1 -6.75,-2 ; -7.25,2 -7.25,3.1 -6.75,3.1 -6.75,2 ; -5.25,-2 -5.25,-3.1 -4.75,-3.1 -4.75,-2 ; -5.25,2 -5.25,3.1 -4.75,3.1 -4.75,2 ; -3.25,-2 -3.25,-3.1 -2.75,-3.1 -2.75,-2 ; -3.25,2 -3.25,3.1 -2.75,3.1 -2.75,2 ; -1.25,-2 -1.25,-3.1 -0.75,-3.1 -0.75,-2 ; -1.25,2 -1.25,3.1 -0.75,3.1 -0.75,2 ; 0.75,-2 0.75,-3.1 1.25,-3.1 1.25,-2 ; 0.75,2 0.75,3.1 1.25,3.1 1.25,2 ; 2.75,-2 2.75,-3.1 3.25,-3.1 3.25,-2 ; 2.75,2 2.75,3.1 3.25,3.1 3.25,2 ; 4.75,-2 4.75,-3.1 5.25,-3.1 5.25,-2 ; 4.75,2 4.75,3.1 5.25,3.1 5.25,2 ; 6.75,-2 6.75,-3.1 7.25,-3.1 7.25,-2 ; 6.75,2 6.75,3.1 7.25,3.1 7.25,2 ; 8.75,-2 8.75,-3.1 9.25,-3.1 9.25,-2 ; 8.75,2 8.75,3.1 9.25,3.1 9.25,2 ; 10.75,-2 10.75,-3.1 11.25,-3.1 11.25,-2 ; 10.75,2 10.75,3.1 11.25,3.1 11.25,2 ; -12,-2 12,-2 12,2 -12,2 -12,-2
Mechanical 15:
  lines w0.05: -0.5,0 0.5,0 ; 0,-0.5 0,0.5 ; -12.4,-3.95 12.4,-3.95 12.4,3.95 -12.4,3.95 -12.4,-3.95
3D body "621024245821.stp": height 4.7, standoff 0, extent -12,-3.1 12,3.1

## 621304245821 [mm] "2.00 mm SMT Dual Pin Header Low Profile (Reel), 4p"
height 4.7
pads (4):
  rect 0.89x3 smd: 1(-1,-2.25) 2(-1,2.25) 3(1,-2.25) 4(1,2.25)
Top Overlay:
  lines w0.2: -1.75,-2.075 -2.2,-2.075 -2.2,2.075 -1.75,2.075 ; 1.75,-2.075 2.2,-2.075 2.2,2.075 1.75,2.075
  text "4" at 1.9,2.5 h1.02
  text "2" at -2.5,2.5 h1.02
  text "3" at 1.9,-3.5 h1.02
  text "1" at -2.2,-3.5 h1.02
Mechanical 13:
  lines w0.1: -1.25,-2 -1.25,-3.1 -0.75,-3.1 -0.75,-2 ; -1.25,2 -1.25,3.1 -0.75,3.1 -0.75,2 ; 0.75,-2 0.75,-3.1 1.25,-3.1 1.25,-2 ; 0.75,2 0.75,3.1 1.25,3.1 1.25,2 ; -2,-2 -2,2 2,2 2,-2 -2,-2
Mechanical 15:
  lines w0.05: -0.5,0 0.5,0 ; 0,-0.5 0,0.5 ; -2.4,-3.95 -2.4,3.95 2.4,3.95 2.4,-3.95 -2.4,-3.95
3D body "621304245821.stp": height 4.7, standoff 0, extent -2,-3.1 2,3.1